# Altium schematic symbol library tps22918dbvr.SchLib: 1 symbol
Pins are listed as number, name and electrical type; pins without a type are passive.

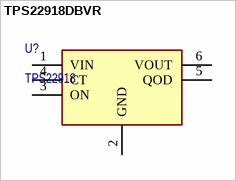
[diagram p0: symbol TPS22918DBVR]

## TPS22918DBVR
designator U?, comment TPS22918
1.6–5.5 V, 2 A load switch with adjustable rise time and configurable output discharge, SOT-23-6; Manufacturer: Texas Instruments; Manufacturer Lifecycle Status: ACTIVE; Manufacturer Part Number: TPS22918DBVR; Fall Time: 2µs; Max Junction Temperature (Tj): 125°C; Max Output current: 2A; Max Supply Voltage: 5.5V; Min Supply Voltage: 1V; Number of Channels: 1; Output Configuration: High Side; Rise Time: 2.54ms; Turn-On Delay Time: 1.95ms; Ambient Temperature Range High: 105°C; Case/Package: SOT-23; Category: Power Switch ICs - Power Distribution; Height: 0m; Lead Free: Lead Free; Length: 2.9mm; Lifecycle Status: Production; Max Operating Temperature: 105°C; Min Operating Temperature: -40°C; Number of Drivers: 1; Number of Outputs: 1; Pins: 6; Output Current: 2A; RoHS: Compliant; Schedule B: 8542390000, 8542390000|8542390000|8542390000|8542390000|8542390000|8542390000|8542390000|8542390000|8542390000|8542390000|8542390000|8542390000|8542390000|8542390000|8542390000|8542390000|8542390000|8542390000|8542390000|8542390000|8542390000|8542390000|8542390000|85; Thickness: 1.2mm; Turn-Off Delay Time: 2µs; Width: 1.6mm
footprint tps22918dbvr
pins: 1 VIN, 2 GND, 3 ON, 4 CT, 5 QOD, 6 VOUT